# Altium footprint library LIS3MDL.PcbLib: 2 footprints
Each footprint in its own frame and in the unit in brackets; x right, y up, seen from the top. Pads: shape width x height; smd on the part's side, far side on the other; paste and mask are expansions set on the pad; w line width, h text height; cw(c..) or ccw(c..) is an arc to the next point about the centre after c.
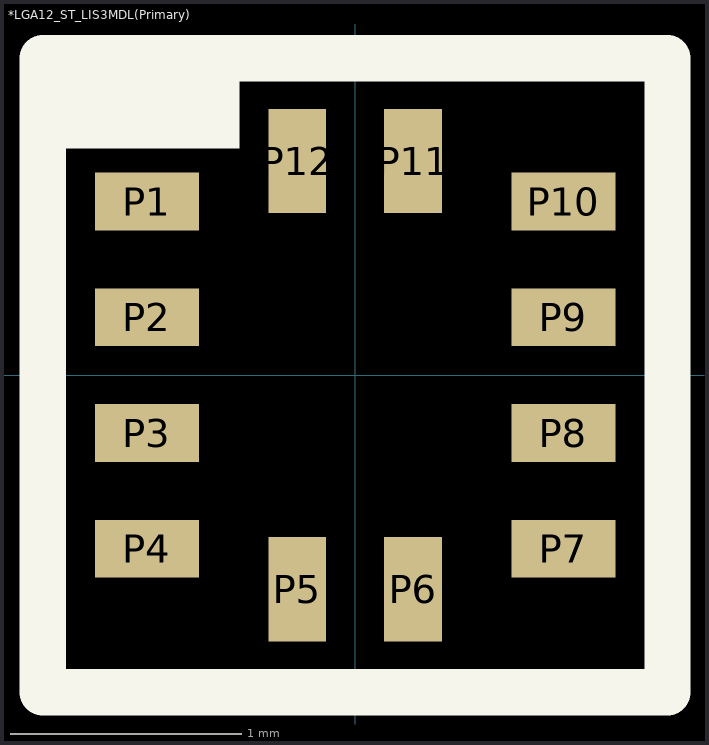
[diagram p0: the footprints below, top view; thin cyan lines are the x and y axes]

## *LGA12_ST_LIS3MDL(Primary) [mm]
pads (12):
  rect 0.45x0.25 smd: P1(-0.9,0.75) P2(-0.9,0.25) P3(-0.9,-0.25) P4(-0.9,-0.75) P7(0.9,-0.75) P8(0.9,-0.25) P9(0.9,0.25) P10(0.9,0.75)
  rect 0.25x0.45 smd: P5(-0.25,-0.925) P6(0.25,-0.925) P11(0.25,0.925) P12(-0.25,0.925)
Top Overlay:
  region: -1.36,1.38 -0.5,1.38 -0.5,0.98 -1.36,0.98
  lines w0.2: -1.35,-1.37 -1.35,1.37 1.35,1.37 1.35,-1.37 -1.35,-1.37

## PCBComponent_1 [mm]